# Altium schematic symbol library MP2315SGJ-P.SchLib: 1 symbol
Pins are listed as number, name and electrical type; pins without a type are passive.

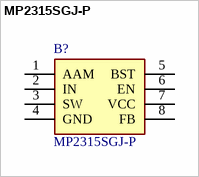
[diagram p0: symbol MP2315SGJ-P]

## MP2315SGJ-P
designator B?
Switching Voltage Regulators 3A 24V Hi Effc.Sync Step Down Converter; Manufacturer_Name: Monolithic Power Systems (MPS); Geometry.Height: 1mm; Mouser Part Number: 946-MP2315SGJ-P; Mouser Price/Stock: https://www.mouser.co.uk/ProductDetail/Monolithic-Power-Systems-MPS/MP2315SGJ-P?qs=Zwj7mHVHPHRNCucLjW2rNg%3D%3D; Manufacturer_Part_Number: MP2315SGJ-P; Datasheet Link: https://www.monolithicpower.com/pub/media/document/MP2315S_r1.0.pdf
footprint SOT65P280X100-8N
pins: 1 AAM, 2 IN, 3 SW, 4 GND, 5 BST, 6 EN, 7 VCC, 8 FB